# Altium footprint library Diode_SMAJ5.0A.PcbLib: 1 footprints
Each footprint in its own frame and in the unit in brackets; x right, y up, seen from the top. Pads: shape width x height; smd on the part's side, far side on the other; paste and mask are expansions set on the pad; w line width, h text height; cw(c..) or ccw(c..) is an arc to the next point about the centre after c.
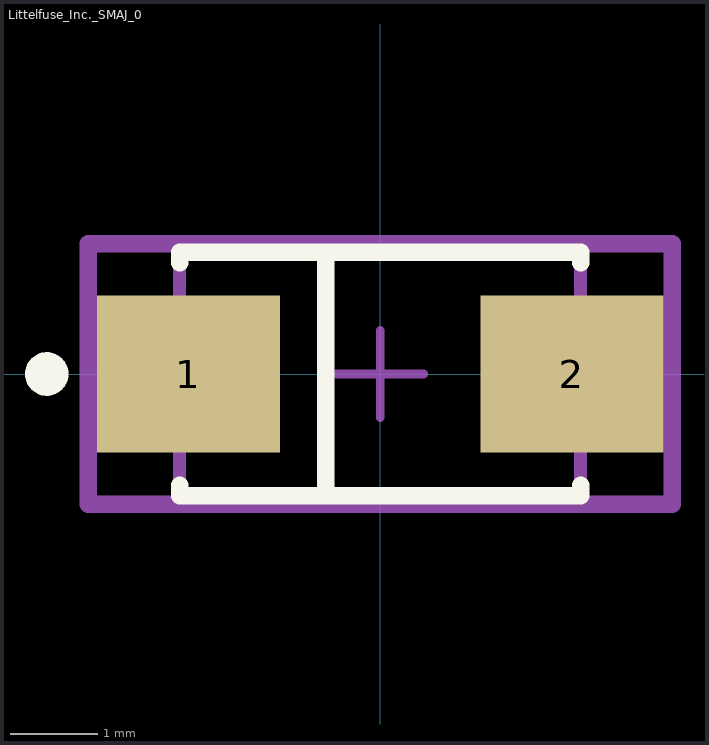
[diagram p0: the footprint, top view; thin cyan lines are the x and y axes]

## Littelfuse_Inc._SMAJ_0 [mm]
pads (2):
  rect 2.1x1.8 smd paste+0 mask+0: 1(-2.2,0) 2(2.2,0)
Top Overlay:
  circle w0.25: c-3.825,0 r0.125
  lines w0.2: -2.3,-1.275 -2.3,-1.395 2.3,-1.395 2.3,-1.275 ; -2.3,1.275 -2.3,1.395 2.3,1.395 2.3,1.275 ; -0.625,-1.3 -0.625,1.3
Mechanical 10:
  lines w0.2: -3.35,-1.495 -3.35,1.495 3.35,1.495 3.35,-1.495 -3.35,-1.495
  text ".Designator" at 0,0 h1
Mechanical 12:
  lines w0.15: -2.3,-1.395 -2.3,1.395 2.3,1.395 2.3,-1.395 -2.3,-1.395
Mechanical 15:
  lines w0.1: -0.5,0 0.5,0 ; 0,-0.5 0,0.5
  lines w0.2: -3.35,-1.495 -3.35,1.495 3.35,1.495 3.35,-1.495 -3.35,-1.495
3D body "Diode_Littelfuse_Inc._SMAJ5.0A_eec.STEP": height 0.25, standoff 0, extent -3.35,-1.495 3.35,1.495